# Altium footprint library 36503205S.PcbLib: 1 footprints
Each footprint in its own frame and in the unit in brackets; x right, y up, seen from the top. Pads: shape width x height; smd on the part's side, far side on the other; paste and mask are expansions set on the pad; w line width, h text height; cw(c..) or ccw(c..) is an arc to the next point about the centre after c.
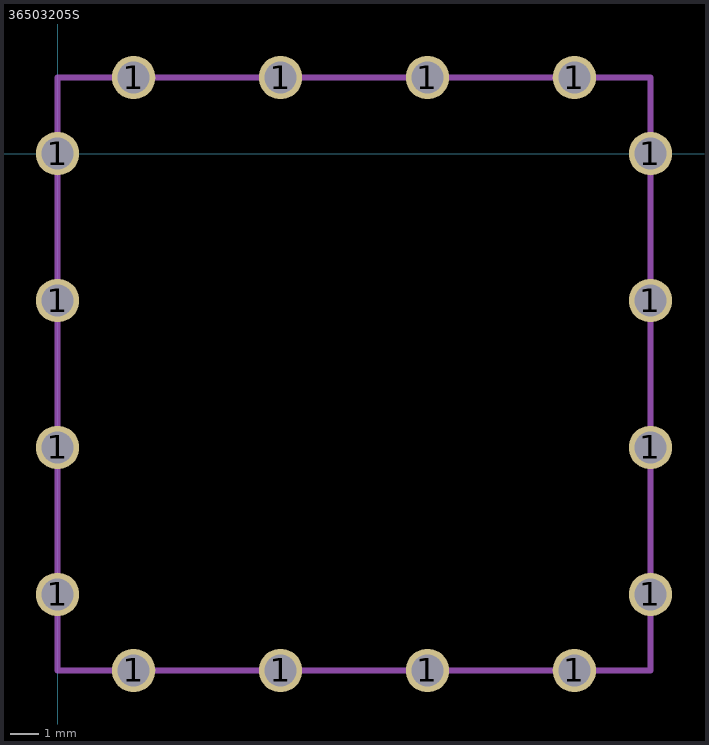
[diagram p0: the footprint, top view; thin cyan lines are the x and y axes]

## 36503205S [mm]
pads (16):
  round 1.5 hole 1.1: 1(0,-15.24) 1(0,-10.16) 1(0,-5.08) 1(0,0) 1(2.63,-17.87) 1(2.63,2.63) 1(7.71,-17.87) 1(7.71,2.63) 1(12.79,-17.87) 1(12.79,2.63) 1(17.87,-17.87) 1(17.87,2.63) 1(20.5,-15.24) 1(20.5,-10.16) 1(20.5,-5.08) 1(20.5,0)
Mechanical 1:
  lines w0.2: 0,-17.87 0,2.63 20.5,2.63 20.5,-17.87 0,-17.87
3D body "Download_STP_WE-SHC-36003200S (rev1).stp": height 3.4, standoff 0.2, extent -0.163,-18.07 20.737,2.83
3D body "Download_STP_WE-SHC-36503205S (rev1).stp": height 3.2, standoff -2.9, extent 0.05,-17.82 20.45,2.58